# Altium footprint library Connectors.PcbLib: 228 footprints (part 10 of 15)
Each footprint in its own frame and in the unit in brackets; x right, y up, seen from the top. Pads: shape width x height; smd on the part's side, far side on the other; paste and mask are expansions set on the pad; w line width, h text height; cw(c..) or ccw(c..) is an arc to the next point about the centre after c.
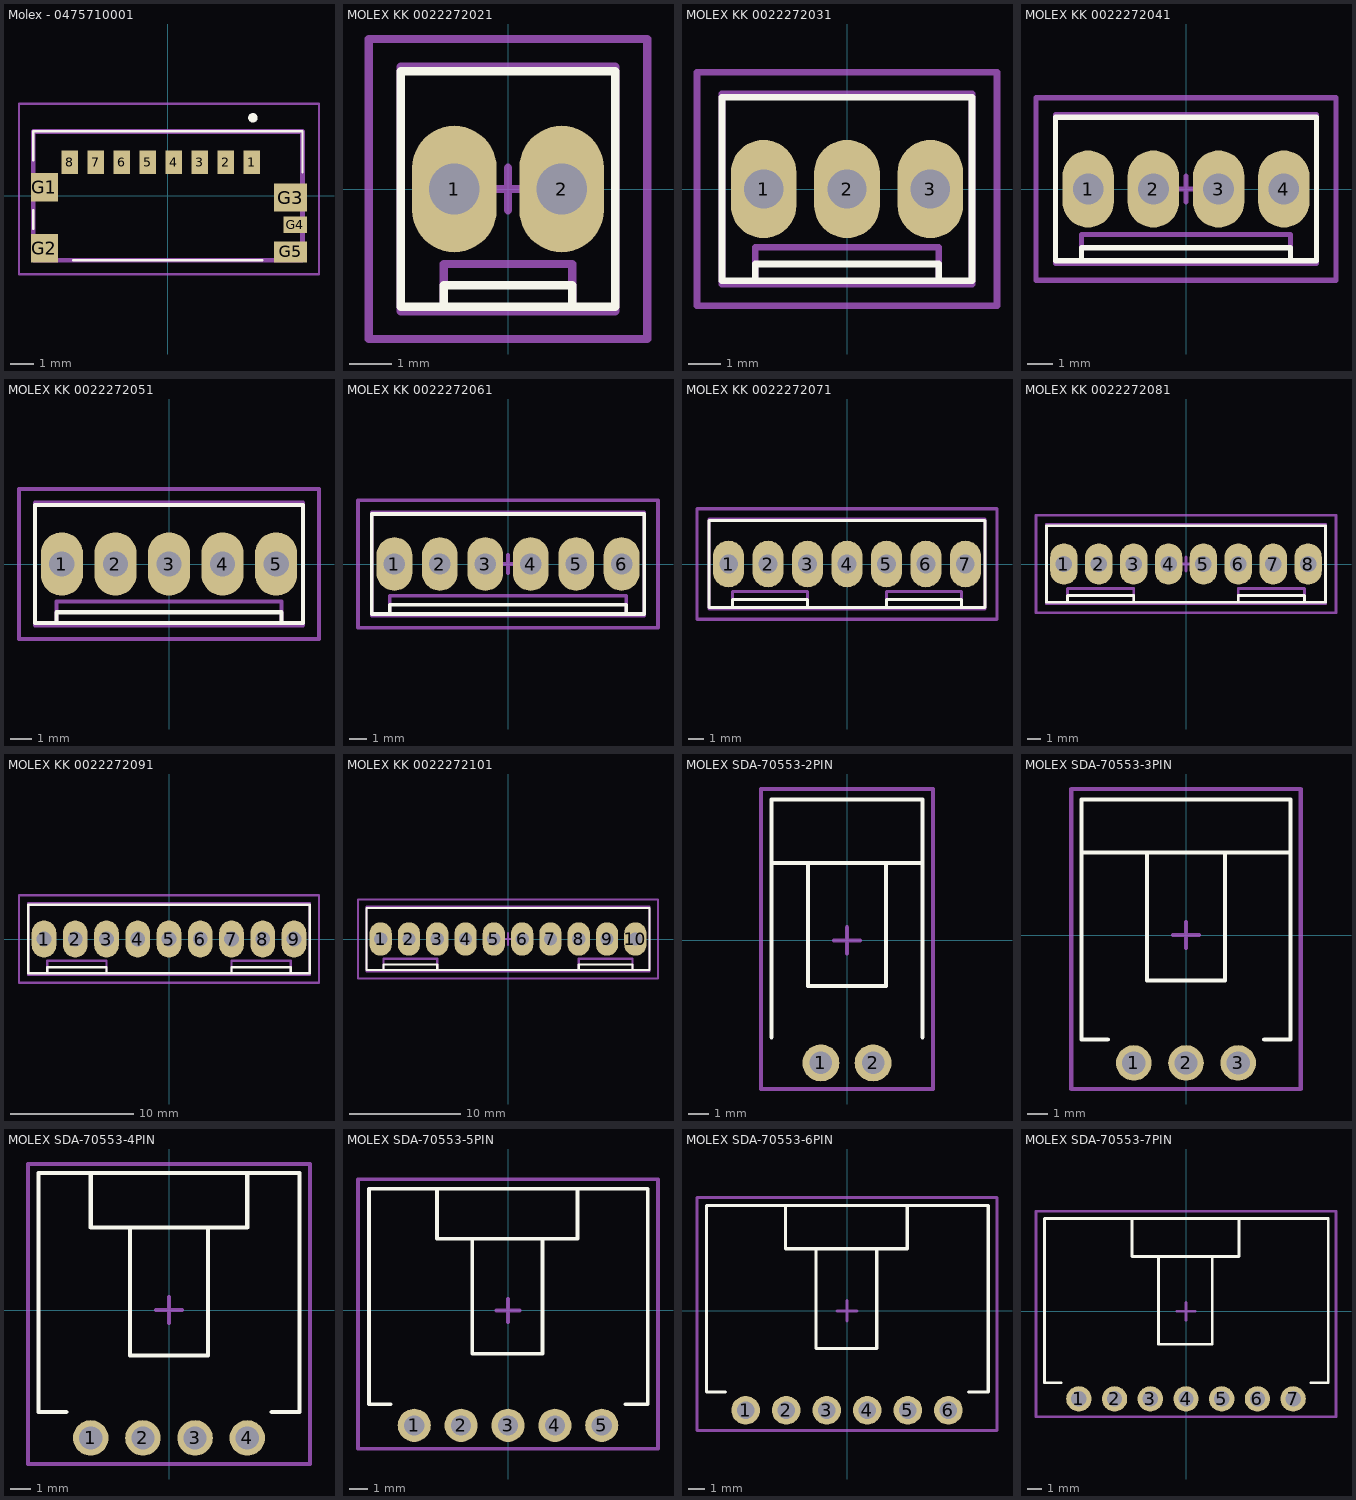
[diagram p9: the footprints below, top view; thin cyan lines are the x and y axes]

## Molex - 0475710001 [mm] "9 (8 + 1) Position Card Connector Secure Digital - microSD™ Surface Mount, Right Angle Gold"
height 2.3
pads (13):
  rect 0.7x1 smd: 1(3.55,1.415) 2(2.45,1.415) 3(1.35,1.415) 4(0.25,1.415) 5(-0.85,1.415) 6(-1.95,1.415) 7(-3.05,1.415) 8(-4.15,1.415)
  rect 1.15x1.2 smd: G1(-5.225,0.365) G2(-5.225,-2.225)
  rect 1.4x1.2 smd: G3(5.2,-0.075)
  rect 1x0.7 smd: G4(5.4,-1.225)
  rect 1.4x0.9 smd: G5(5.2,-2.375)
Top Overlay:
  lines w0.1: -5.7,-1.4 -5.7,-0.6 ; -5.7,1.5 -5.7,2.725 5.7,2.725 5.7,1 ; -4,-2.725 4,-2.725
  lines w0.2: 3.5,3.3 ccw(c3.6,3.3) 3.7,3.3 ccw(c3.6,3.3) 3.5,3.3
Top Component Outline:
  lines w0.2: -5.7,-2.725 5.7,-2.725 5.7,2.725 -5.7,2.725 -5.7,-2.725
Top Courtyard:
  lines w0.1: -6.3,-3.325 6.4,-3.325 6.4,3.9 -6.3,3.9 -6.3,-3.325
3D body "Molex - 475710001.stp": height 2.26, standoff -0.03, extent -5.775,-2.675 5.625,2.775

## MOLEX KK 0022272021 [mm]
height 11.6
pads (2):
  oval 2x3 hole 1.2: 1(-1.27,0) 2(1.27,0)
Top Overlay:
  lines w0.2: -1.524,-2.794 -1.524,-2.286 1.524,-2.286 1.524,-2.794 ; -2.54,-2.794 2.54,-2.794 2.54,2.794 -2.54,2.794 -2.54,-2.794
Top Component Outline:
  lines w0.2: -1.524,-2.9 -1.524,-1.778 1.524,-1.778 1.524,-2.9 ; -2.54,-2.9 2.54,-2.9 2.54,2.9 -2.54,2.9 -2.54,-2.9
Top Courtyard:
  lines w0.2: -0.508,0 0.508,0 ; 0,-0.508 0,0.508 ; -3.302,-3.556 -1.016,-3.556 3.302,-3.556 3.302,-1.016 3.302,3.556 -3.302,3.556 -3.302,-3.556
3D body "MOLEX KK 022272021.STEP": height 11.7, standoff -3.56, extent -2.54,-2.9 2.54,2.9

## MOLEX KK 0022272031 [mm]
height 11.6
pads (3):
  oval 2x3 hole 1.2: 1(-2.54,0) 2(0,0) 3(2.54,0)
Top Overlay:
  lines w0.2: -2.794,-2.794 -2.794,-2.286 2.794,-2.286 2.794,-2.794 ; -3.81,-2.794 3.81,-2.794 3.81,2.794 -3.81,2.794 -3.81,-2.794
Top Component Outline:
  lines w0.2: -2.794,-2.9 -2.794,-1.778 2.794,-1.778 2.794,-2.9 ; -3.81,-2.9 -3.81,2.9 3.81,2.9 3.81,-2.9 -3.81,-2.9
Top Courtyard:
  lines w0.2: -0.508,0 0.508,0 ; 0,-0.508 0,0.508 ; -4.572,-3.556 -4.572,3.556 4.572,3.556 4.572,-1.016 4.572,-3.556 -2.286,-3.556 -4.572,-3.556
3D body "MOLEX KK 022272031.STEP": height 11.7, standoff -3.56, extent -3.81,-2.9 3.81,2.9

## MOLEX KK 0022272041 [mm]
height 11.6
pads (4):
  oval 2x3 hole 1.2: 1(-3.81,0) 2(-1.27,0) 3(1.27,0) 4(3.81,0)
Top Overlay:
  lines w0.2: -4.064,-2.794 -4.064,-2.286 4.064,-2.286 4.064,-2.794 ; -5.08,-2.794 5.08,-2.794 5.08,2.794 -5.08,2.794 -5.08,-2.794
Top Component Outline:
  lines w0.2: -4.064,-2.9 -4.064,-1.778 4.064,-1.778 4.064,-2.9 ; -5.08,-2.9 -5.08,2.9 5.08,2.9 5.08,-2.9 -5.08,-2.9
Top Courtyard:
  lines w0.2: -0.508,0 0.508,0 ; 0,-0.508 0,0.508 ; -5.842,-3.556 -5.842,3.556 5.842,3.556 5.842,-1.016 5.842,-3.556 -3.556,-3.556 -5.842,-3.556
3D body "MOLEX KK 022272041.STEP": height 11.7, standoff -3.56, extent -5.08,-2.9 5.08,2.9

## MOLEX KK 0022272051 [mm]
height 11.6
pads (5):
  oval 2x3 hole 1.2: 1(-5.08,0) 2(-2.54,0) 3(0,0) 4(2.54,0) 5(5.08,0)
Top Overlay:
  lines w0.2: -5.334,-2.794 -5.334,-2.286 5.334,-2.286 5.334,-2.794 ; -6.35,-2.794 6.35,-2.794 6.35,2.794 -6.35,2.794 -6.35,-2.794
Top Component Outline:
  lines w0.2: -5.334,-2.9 -5.334,-1.778 5.334,-1.778 5.334,-2.9 ; -6.35,-2.9 -6.35,2.9 6.35,2.9 6.35,-2.9 -6.35,-2.9
Top Courtyard:
  lines w0.2: -0.508,0 0.508,0 ; 0,-0.508 0,0.508 ; -7.112,-3.556 -7.112,3.556 7.112,3.556 7.112,-1.016 7.112,-3.556 -7.112,-3.556
3D body "MOLEX KK 022272051.STEP": height 11.7, standoff -3.56, extent -6.35,-2.9 6.35,2.9

## MOLEX KK 0022272061 [mm]
height 11.6
pads (6):
  oval 2x3 hole 1.2: 1(-6.35,0) 2(-3.81,0) 3(-1.27,0) 4(1.27,0) 5(3.81,0) 6(6.35,0)
Top Overlay:
  lines w0.2: -6.604,-2.794 -6.604,-2.286 6.604,-2.286 6.604,-2.794 ; -7.62,-2.794 7.62,-2.794 7.62,2.794 -7.62,2.794 -7.62,-2.794
Top Component Outline:
  lines w0.2: -6.604,-2.9 -6.604,-1.778 6.604,-1.778 6.604,-2.9 ; -7.62,-2.9 -7.62,2.9 7.62,2.9 7.62,-2.9 -7.62,-2.9
Top Courtyard:
  lines w0.2: -0.508,0 0.508,0 ; 0,-0.508 0,0.508 ; -8.382,-3.556 -8.382,3.556 8.382,3.556 8.382,-1.016 8.382,-3.556 -8.382,-3.556
3D body "MOLEX KK 022272061.STEP": height 11.7, standoff -3.56, extent -7.62,-2.9 7.62,2.9

## MOLEX KK 0022272071 [mm]
height 11.6
pads (7):
  oval 2x3 hole 1.2: 1(-7.62,0) 2(-5.08,0) 3(-2.54,0) 4(0,0) 5(2.54,0) 6(5.08,0) 7(7.62,0)
Top Overlay:
  lines w0.2: -7.366,-2.794 -7.366,-2.286 -2.54,-2.286 -2.54,-2.794 ; 2.54,-2.794 2.54,-2.286 7.366,-2.286 7.366,-2.794 ; -8.89,-2.794 8.89,-2.794 8.89,2.794 -8.89,2.794 -8.89,-2.794
Top Component Outline:
  lines w0.2: -7.366,-2.9 -7.366,-1.778 -2.54,-1.778 -2.54,-2.9 ; 2.54,-2.9 2.54,-1.778 7.366,-1.778 7.366,-2.9 ; -8.89,-2.9 -8.89,2.9 8.89,2.9 8.89,-2.9 -8.89,-2.9
Top Courtyard:
  lines w0.2: -0.508,0 0.508,0 ; 0,-0.508 0,0.508 ; -9.652,-3.556 -9.652,3.556 9.652,3.556 9.652,-1.016 9.652,-3.556 -9.652,-3.556
3D body "MOLEX KK 022272071.STEP": height 11.7, standoff -3.56, extent -8.89,-2.9 8.89,2.9

## MOLEX KK 0022272081 [mm]
height 11.6
pads (8):
  oval 2x3 hole 1.2: 1(-8.89,0) 2(-6.35,0) 3(-3.81,0) 4(-1.27,0) 5(1.27,0) 6(3.81,0) 7(6.35,0) 8(8.89,0)
Top Overlay:
  lines w0.2: -8.636,-2.794 -8.636,-2.286 -3.81,-2.286 -3.81,-2.794 ; 3.81,-2.794 3.81,-2.286 8.636,-2.286 8.636,-2.794 ; -10.16,-2.794 10.16,-2.794 10.16,2.794 -10.16,2.794 -10.16,-2.794
Top Component Outline:
  lines w0.2: -8.636,-2.9 -8.636,-1.778 -3.81,-1.778 -3.81,-2.9 ; 3.81,-2.9 3.81,-1.778 8.636,-1.778 8.636,-2.9 ; -10.16,-2.9 -10.16,2.9 10.16,2.9 10.16,-2.9 -10.16,-2.9
Top Courtyard:
  lines w0.2: -0.508,0 0.508,0 ; 0,-0.508 0,0.508 ; -10.922,-3.556 -10.922,3.556 10.922,3.556 10.922,-1.016 10.922,-3.556 -10.922,-3.556
3D body "MOLEX KK 022272081.STEP": height 11.7, standoff -3.56, extent -10.16,-2.9 10.16,2.9

## MOLEX KK 0022272091 [mm]
height 11.6
pads (9):
  oval 2x3 hole 1.2: 1(-10.16,0) 2(-7.62,0) 3(-5.08,0) 4(-2.54,0) 5(0,0) 6(2.54,0) 7(5.08,0) 8(7.62,0) 9(10.16,0)
Top Overlay:
  lines w0.2: -9.906,-2.794 -9.906,-2.286 -5.08,-2.286 -5.08,-2.794 ; 5.08,-2.794 5.08,-2.286 9.906,-2.286 9.906,-2.794 ; -11.43,-2.794 -11.43,2.794 11.43,2.794 11.43,-2.794 -11.43,-2.794
Top Component Outline:
  lines w0.2: -9.906,-2.9 -9.906,-1.778 -5.08,-1.778 -5.08,-2.9 ; 5.08,-2.9 5.08,-1.778 9.906,-1.778 9.906,-2.9 ; -11.43,-2.9 11.43,-2.9 11.43,2.9 -11.43,2.9 -11.43,-2.9
Top Courtyard:
  lines w0.2: -0.508,0 0.508,0 ; 0,-0.508 0,0.508 ; -12.192,-3.556 12.192,-3.556 12.192,-1.016 12.192,3.556 -12.192,3.556 -12.192,-3.556
3D body "MOLEX KK 022272091.STEP": height 11.7, standoff -3.56, extent -11.43,-2.9 11.43,2.9

## MOLEX KK 0022272101 [mm]
height 11.6
pads (10):
  oval 2x3 hole 1.2: 1(-11.43,0) 2(-8.89,0) 3(-6.35,0) 4(-3.81,0) 5(-1.27,0) 6(1.27,0) 7(3.81,0) 8(6.35,0) 9(8.89,0) 10(11.43,0)
Top Overlay:
  lines w0.2: -11.176,-2.794 -11.176,-2.286 -6.35,-2.286 -6.35,-2.794 ; 6.35,-2.794 6.35,-2.286 11.176,-2.286 11.176,-2.794 ; -12.7,-2.794 12.7,-2.794 12.7,2.794 -12.7,2.794 -12.7,-2.794
Top Component Outline:
  lines w0.2: -11.176,-2.9 -11.176,-1.778 -6.35,-1.778 -6.35,-2.9 ; 6.35,-2.9 6.35,-1.778 11.176,-1.778 11.176,-2.9 ; -12.7,-2.9 -12.7,2.9 12.7,2.9 12.7,-2.9 -12.7,-2.9
Top Courtyard:
  lines w0.2: -0.508,0 0.508,0 ; 0,-0.508 0,0.508 ; -13.462,-3.556 -13.462,3.556 13.462,3.556 13.462,-1.016 13.462,-3.556 -13.462,-3.556
3D body "MOLEX KK 022272101.STEP": height 11.7, standoff -3.56, extent -12.7,-2.9 12.7,2.9

## MOLEX SDA-70553-2PIN [mm] "SL Right angle header with latch, 0.100 centres, SDA-70553"
height 6.99
pads (2):
  round 1.8 hole 1.09: 1(-1.27,-5.969) 2(1.27,-5.969)
Top Overlay:
  lines w0.2: -3.683,-4.719 -3.683,6.858 3.683,6.858 3.683,-4.719 ; -3.627,3.765 3.683,3.765 ; -1.905,3.765 -1.905,-2.219 1.905,-2.219 1.905,3.765
Top Courtyard:
  lines w0.2: -0.635,0 0.635,0 ; 0,-0.635 0,0.635 ; -4.191,-7.239 4.191,-7.239 4.191,7.366 -4.191,7.366 -4.191,-7.239
3D body "705530001.STEP": height 6.96, standoff -3.32, extent -3.683,-6.719 3.683,6.87

## MOLEX SDA-70553-3PIN [mm] "SL Right Angle Header W/LAtch & Trip-Pegs 2.54mm Centres"
height 6.99
pads (3):
  round 1.73 hole 1.13: 1(-2.54,-6.223) 2(0,-6.223) 3(2.54,-6.223)
Top Overlay:
  lines w0.2: -5.08,4.019 5.08,4.019 ; -3.81,-5.08 -5.08,-5.08 -5.08,6.604 5.08,6.604 5.08,-5.08 3.81,-5.08 ; -1.905,4.019 -1.905,-2.219 1.905,-2.219 1.905,4.019
Top Courtyard:
  lines w0.2: -0.635,0 0.635,0 ; 0,-0.635 0,0.635 ; -5.588,-7.493 -4.953,-7.493 5.588,-7.493 5.588,7.112 -5.588,7.112 -5.588,-7.493
3D body "705530002.STEP": height 6.98, standoff -3.3, extent -5.08,-6.923 5.08,6.666

## MOLEX SDA-70553-4PIN [mm] "SL Right Angle Header W/LAtch & Trip-Pegs 2.54mm Centres"
height 6.99
pads (4):
  round 1.73 hole 1.13: 1(-3.81,-6.223) 2(-1.27,-6.223) 3(1.27,-6.223) 4(3.81,-6.223)
Top Overlay:
  lines w0.2: -5,-4.953 -6.35,-4.953 -6.35,6.677 6.35,6.677 6.35,-4.953 5,-4.953 ; -3.81,6.677 -3.81,4.019 3.81,4.019 3.81,6.677 ; -1.905,4.019 -1.905,-2.219 1.905,-2.219 1.905,4.019
Top Courtyard:
  lines w0.2: -0.635,0 0.635,0 ; 0,-0.635 0,0.635 ; -6.858,-7.493 6.858,-7.493 6.858,7.112 -6.858,7.112 -6.858,-7.493
3D body "705530003.STEP": height 6.98, standoff -3.3, extent -6.35,-6.923 6.35,6.666

## MOLEX SDA-70553-5PIN [mm] "SL Right angle header with latch, 0.100 centres, SDA-70553"
height 6.99
pads (5):
  round 1.8 hole 1.09: 1(-5.08,-6.223) 2(-2.54,-6.223) 3(0,-6.223) 4(2.54,-6.223) 5(5.08,-6.223)
Top Overlay:
  lines w0.2: -6.35,-5.08 -7.533,-5.08 -7.533,-4.973 -7.533,6.604 7.58,6.604 7.58,-4.973 7.58,-5.08 6.35,-5.08 ; -3.85,6.55 -3.85,3.892 3.77,3.892 3.77,6.55 ; -1.945,3.892 -1.945,-2.346 1.865,-2.346 1.865,3.892
Top Courtyard:
  lines w0.2: -0.635,0 0.635,0 ; 0,-0.635 0,0.635 ; -8.128,-7.493 -8.128,7.112 8.128,7.112 8.128,-7.493 -8.128,-7.493
3D body "705530004.STEP": height 6.96, standoff -3.32, extent -7.58,-6.973 7.66,6.616

## MOLEX SDA-70553-6PIN [mm] "SL Right angle header with latch, 0.100 centres, SDA-70553"
height 6.99
pads (6):
  round 1.8 hole 1.09: 1(-6.35,-6.223) 2(-3.81,-6.223) 3(-1.27,-6.223) 4(1.27,-6.223) 5(3.81,-6.223) 6(6.35,-6.223)
Top Overlay:
  lines w0.2: -7.62,-5.08 -8.803,-5.08 -8.803,-4.973 -8.803,6.604 8.85,6.604 8.85,-4.973 8.85,-5.08 7.62,-5.08 ; -3.85,6.55 -3.85,3.892 3.77,3.892 3.77,6.55 ; -1.945,3.892 -1.945,-2.346 1.865,-2.346 1.865,3.892
Top Courtyard:
  lines w0.2: -0.635,0 0.635,0 ; 0,-0.635 0,0.635 ; -9.398,-7.493 -9.398,7.112 9.398,7.112 9.398,-7.493 -9.398,-7.493
3D body "705530005.STEP": height 6.96, standoff -3.32, extent -8.85,-6.973 8.93,6.616

## MOLEX SDA-70553-7PIN [mm] "SL Right angle header with latch, 0.100 centres, SDA-70553"
height 6.99
pads (7):
  round 1.8 hole 1.09: 1(-7.62,-6.223) 2(-5.08,-6.223) 3(-2.54,-6.223) 4(0,-6.223) 5(2.54,-6.223) 6(5.08,-6.223) 7(7.62,-6.223)
Top Overlay:
  lines w0.2: -8.89,-5.08 -10.073,-5.08 -10.073,-4.973 -10.073,6.604 10.12,6.604 10.12,-4.973 10.12,-5.08 8.89,-5.08 ; -3.85,6.55 -3.85,3.892 3.77,3.892 3.77,6.55 ; -1.945,3.892 -1.945,-2.346 1.865,-2.346 1.865,3.892
Top Courtyard:
  lines w0.2: -0.635,0 0.635,0 ; 0,-0.635 0,0.635 ; -10.668,-7.493 10.668,-7.493 10.668,7.112 -10.668,7.112 -10.668,-7.493
3D body "705530006.STEP": height 6.96, standoff -3.32, extent -10.12,-6.973 10.2,6.616